# Altium schematic symbol library 0454005.MR.SchLib: 1 symbol
Pins are listed as number, name and electrical type; pins without a type are passive.

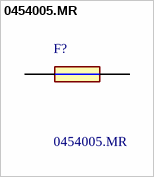
[diagram p0: symbol 0454005.MR]

## 0454005.MR
designator F?
Surface Mount Fuses 125VAC 5A .0136ohms 454 NANO2  Small size  Wide range of current rating available (0.375A to 12A)  Wide operating temperature range  RoHS compliant and Halogen Free  UL Recognized to UL/ CSA/NMX UL 248-1 and UL/CSA/NMX UL 248-14  Conforms to DENANs Appendix 3; Manufacturer_Name: LITTELFUSE; Geometry.Height: 2.94mm; Manufacturer_Part_Number: 0454005.MR; Mouser Part Number: 576-0454005.MR; Mouser Price/Stock: https://www.mouser.co.uk/ProductDetail/Littelfuse/0454005MR?qs=WtG364jHAdzqVvZG3rAI%2Fw%3D%3D; Arrow Part Number: 0454005.MR; Arrow Price/Stock: https://www.arrow.com/en/products/0454005.mr/littelfuse?region=nac; Datasheet Link: https://www.mouser.com/datasheet/2/240/media-3321648.pdf
footprint FUSC6127X294N
pins: 1, 2